# Altium schematic symbol library T491B105M025AT.SchLib: 1 symbol
Pins are listed as number, name and electrical type; pins without a type are passive.

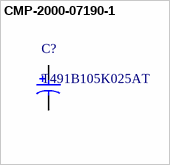
[diagram p0: symbol CMP-2000-07190-1]

## CMP-2000-07190-1
designator C?, comment T491B105K025AT
Tantalum Capacitor, 1 uF, +/- 10%, 25 V, -55 to 125 degC, 1411 (3528 Metric), RoHS, Tape and Reel; Manufacturer: Kemet; Wire Form: NotRequired; DF: 4%; Product Diameter (mm): NotRequiredmm; Product Depth (mm): 2.8mm; Voltage: 25VDC; DCL: 0.5uA; Capacitance: 1uF; Product Height (mm): 1.9mm; ESR: 5ohm; Product Length (mm): 3.5mm; Polarity: Polar; Case Style: Molded; Package / Case: 3528-21; Failure Rate: NotRequired; Datasheet Version: 10/2016; Seal: NotRequired; Package Reference: T491-B; Insulation: NotRequired; Tolerance (+ or -): 10%; Length W/Weld: NotRequiredmm; Lead Spacing (nom): NotRequiredmm; Packaging: TapeandReel; Operating Temp Range: -55Cto125C; Case Code: B; Mounting Technology: SurfaceMount; Datasheet URL: http://capacitoredge.kemet.com/capedge2/DataSheet/Datasheet-T491B105K025AT.pdf?pn=T491B105K025AT; Construction: SMTChip; Seated Plane Height: NotRequiredmm; Manufacturer URL: http://www.kemet.com/; Mounting Style: SurfaceMount; Package Description: 2-Pin Surface Mount Device, Body 3.5 x 2.8 mm
footprint KEMT-T491-B_M (Molded Capacitor, 2-Leads, Body 3.70x3.00mm, IPC Low Density)
footprint KEMT-T491-B_L (Molded Capacitor, 2-Leads, Body 3.70x3.00mm, IPC High Density)
footprint KEMT-T491-B_N (Molded Capacitor, 2-Leads, Body 3.70x3.00mm, IPC Medium Density)
pins: 1, 2